# Altium schematic symbol library SM04B-GHS-TB.SchLib: 1 symbol
Pins are listed as number, name and electrical type; pins without a type are passive.

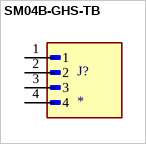
[diagram p0: symbol SM04B-GHS-TB]

## SM04B-GHS-TB
designator J?
Connector Header Surface Mount, Right Angle 4 position 0.049 (1.25mm); MF: JST Sales; MP: SM04B-GHS-TB; SnapEDA_Link: https://www.snapeda.com/parts/SM04B-GHS-TB/JST/view-part/?ref=snap; Package: None; Value: *; Check_prices: https://www.snapeda.com/parts/SM04B-GHS-TB/JST/view-part/?ref=eda
footprint JST_SM04B-GHS-TB
pins: 1, 2, 3, 4